# Altium footprint library Connectors.PcbLib: 320 footprints (part 6 of 20)
Each footprint in its own frame and in the unit in brackets; x right, y up, seen from the top. Pads: shape width x height; smd on the part's side, far side on the other; paste and mask are expansions set on the pad; w line width, h text height; cw(c..) or ccw(c..) is an arc to the next point about the centre after c.
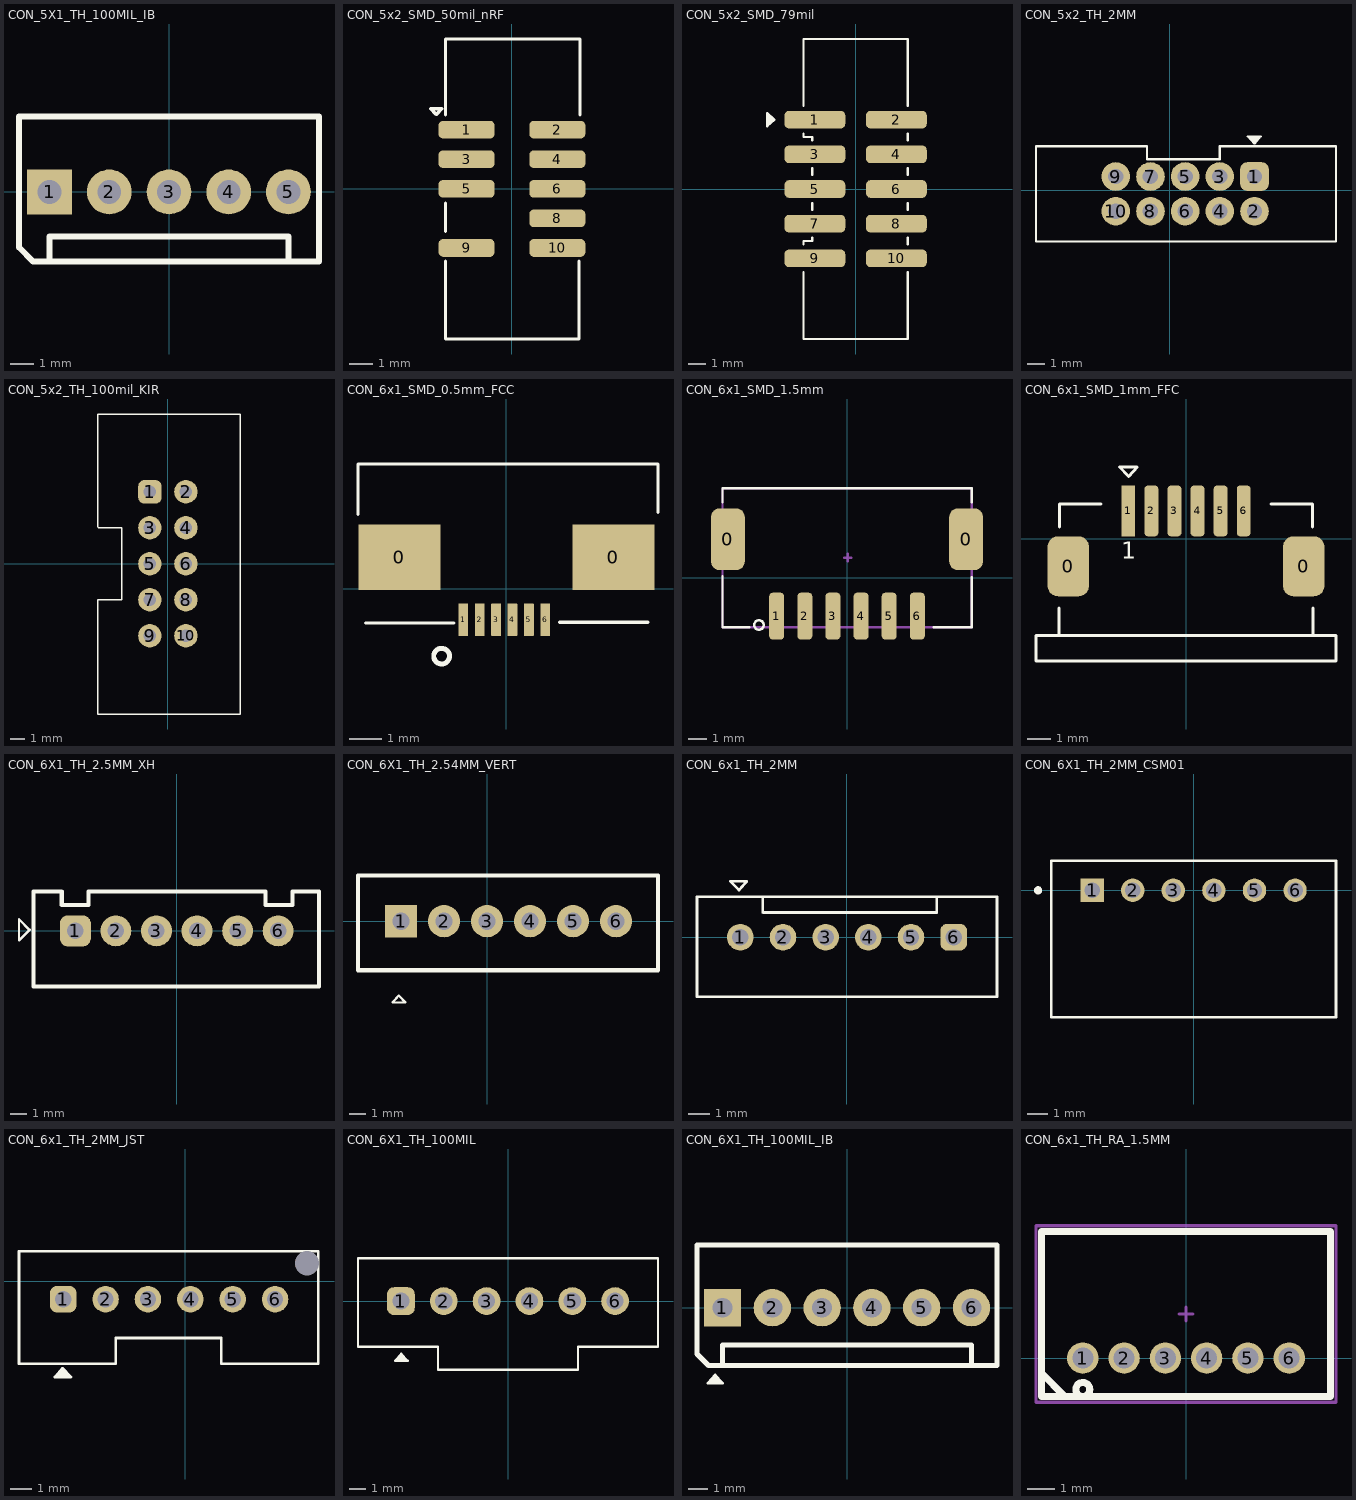
[diagram p5: the footprints below, top view; thin cyan lines are the x and y axes]

## CON_5X1_TH_100MIL_IB [mil] "/20200110/V-A.Patino"
pads (5):
  rect 75x75 hole 40: 1(-200,0)
  round 75 hole 40: 2(-100,0) 3(0,0) 4(100,0) 5(200,0)
Top Overlay:
  lines w10: -200,-115.35 -200,-75 200,-75 200,-114.96 ; -251.18,-92.91 -251.18,125.98 251.18,125.98 251.18,-116.14 -227.95,-116.14 -251.18,-92.91
3D body "022272051.stp": height 461.13, standoff -139.65, extent -251.18,-112.99 248.82,115.35

## CON_5x2_SMD_50mil_nRF [mm] "/ 200102/ C-A.Serna.A"
pads (9):
  rrect50% 2.4x0.76 smd: 1(-1.95,2.54) 2(1.95,2.54) 3(-1.95,1.27) 4(1.95,1.27) 5(-1.95,0) 6(1.95,0) 8(1.95,-1.27) 9(-1.95,-2.54) 10(1.95,-2.54)
Top Overlay:
  lines w0.127: -2.85,-3.104 -2.85,-6.45 2.87,-6.45 2.87,-3.104 ; -2.85,-1.829 -2.85,-0.61 ; -2.85,3.166 -2.85,6.432 2.915,6.432 2.915,3.166
  lines w0.152: -3.26,3.201 -3.239,3.201 ; -3.26,3.201 -3.239,3.201 ; -3.26,3.201 -3.49,3.43 -3.01,3.43 -3.239,3.201
3D body "3220-10-0300.step": height 5.61, standoff 0.01, extent -2.71,-6.33 2.79,6.32

## CON_5x2_SMD_79mil [mm] "/ 20191104 / C-D Viveros"
pads (10):
  rrect50% 3.5x1.02 smd: 1(-2.35,4) 2(2.35,4) 3(-2.35,2) 4(2.35,2) 5(-2.35,0) 6(2.35,0) 7(-2.35,-2) 8(2.35,-2) 9(-2.35,-4) 10(2.35,-4)
Top Overlay:
  region: -5.1,4.381 -5.1,3.619 -4.686,4.014
  lines w0.127: -3,-4.8 -3,-8.65 3,-8.65 3,-4.8 ; -3,-3.2 -3,-3 -2.5,-3 -2.5,-2.8 ; -3,3.2 -3,3 -2.5,3 -2.5,2.8 ; -3,4.8 -3,8.65 3,8.65 3,4.8 ; -2.5,-1.2 -2.5,-0.8 ; -2.5,0.8 -2.5,1.2 ; 3,-3.2 3,-2.8 ; 3,-1.2 3,-0.8 ; 3,0.8 3,1.2 ; 3,2.8 3,3.2 ; -5.1,3.619 -4.686,4.014 -5.1,4.381 -5.1,3.619
3D body "SBH21-_ _ _N-D05-SM-_ _.STEP": height 6.96, standoff 0.01, extent -3.8,-8.65 3.8,8.65

## CON_5x2_TH_2MM [mil] "20230525/ J.Jaramillo"
pads (10):
  rrect50% 65x65 hole 35: 1(192.91,31.5)
  round 65 hole 35: 2(192.91,-47.24) 3(114.17,31.5) 4(114.17,-47.24) 5(35.43,31.5) 6(35.43,-47.24) 7(-43.31,31.5) 8(-43.31,-47.24) 9(-122.05,31.5) 10(-122.05,-47.24)
Top Overlay:
  region: 207.35,122.62 177.35,122.62 192.91,106.3
  lines w5: -303.15,-116.29 -303.15,100.39 -51.18,100.39 -51.18,70.87 114.17,70.87 114.17,100.39 377.95,100.39 377.95,-116.29 -303.15,-116.29 ; 177.35,122.62 192.91,106.3 207.35,122.62 177.35,122.62
3D body "A2005WV-N-2x5P.stp": height 224.41, standoff -110.24, extent -305.49,-116.29 375.61,100.25

## CON_5x2_TH_100mil_KIR [mil] "/ 20190221 / C-A.Serna.A"
pads (10):
  rrect50% 65x65 hole 35: 1(-50,200)
  round 65 hole 35: 2(50,200) 3(-50,100) 4(50,100) 5(-50,0) 6(50,0) 7(-50,-100) 8(50,-100) 9(-50,-200) 10(50,-200)
Top Overlay:
  lines w3.94: -195,101 -195,416 201,416 201,-417 -195,-417 -195,-100 -128,-100 -128,100 -194,100
3D body "User Library-BH_10_V.STEP": height 393.7, standoff -78.74, extent -179,-400 179.27,400

## CON_6x1_SMD_0.5mm_FCC [mm] "/20210126/J-E.Pachon"
pads (8):
  rect 2.5x2 smd: 0(-3.262,0.95) 0(3.262,0.95)
  rrect20% 0.3x1 smd mask+0.076: 1(-1.312,-0.95) 2(-0.812,-0.95) 3(-0.312,-0.95) 4(0.188,-0.95) 5(0.688,-0.95) 6(1.188,-0.95)
Top Overlay:
  circle w0.152: c-1.974,-2.062 r0.24
  lines w0.102: -4.522,2.268 -4.522,3.8 4.625,3.8 4.625,2.318 ; -4.296,-1.052 -1.604,-1.052 ; 1.622,-1.03 4.315,-1.03
3D body "545480671.stp": height 1.17, standoff -0.03, extent -4.167,-1.079 4.033,3.921

## CON_6x1_SMD_1.5mm [mm] "/ 20201109/ N-A.Potosi"
pads (8):
  rrect50% 1.8x3.3 smd: 0(-6.35,2.05) 0(6.35,2.05)
  rrect50% 0.8x2.5 smd: 1(-3.75,-2.05) 2(-2.25,-2.05) 3(-0.75,-2.05) 4(0.75,-2.05) 5(2.25,-2.05) 6(3.75,-2.05)
Top Overlay:
  circle w0.127: c-4.696,-2.523 r0.254
  lines w0.127: -6.64,0.08 -6.64,-2.64 -5.22,-2.64 ; -6.64,4.02 -6.64,4.76 6.66,4.76 6.66,4.03 ; 4.62,-2.64 6.66,-2.64 6.66,0.02
Mechanical 1:
  lines w0.127: -6.64,-2.64 -6.64,4.76 6.66,4.76 6.66,-2.64 -6.64,-2.64
Mechanical 15:
  lines w0.127: -0.16,1.07 0.24,1.07 ; 0.04,0.87 0.04,1.27 ; -6.64,-2.64 6.66,-2.64 6.66,4.76 -6.64,4.76 -6.64,-2.64
3D body "5025840670.stp": height 7.28, standoff -0.02, extent -6.64,-2.64 6.66,4.76

## CON_6x1_SMD_1mm_FFC [mm] "/ 20230224/ N-A.Potosi"
pads (8):
  rrect50% 1.8x2.6 smd: 0(-5.1,-1.2) 0(5.1,-1.2)
  rect 0.6x2.2 smd: 1(-2.5,1.2)
  rrect50% 0.6x2.2 smd: 2(-1.5,1.2) 3(-0.5,1.2) 4(0.5,1.2) 5(1.5,1.2) 6(2.5,1.2)
Top Overlay:
  lines w0.127: -5.5,-3 -5.5,-4.2 ; -5.477,0.5 -5.477,1.5 -3.677,1.5 ; 3.677,1.5 5.477,1.5 5.477,0.5 ; 5.5,-3 5.5,-4.2 ; -5.5,-4.2 -6.5,-4.2 -6.5,-5.3 6.5,-5.3 6.5,-4.2 5.5,-4.2 ; -5.5,-4.2 5.5,-4.2 ; -2.881,3.1 -2.486,2.686 -2.119,3.1 -2.881,3.1
  text "1" at -2.806,-1.127 h1.26
3D body "686106148922_Download_STP_686106148922_rev1.stp": height 2.3, standoff 0.05, extent -5.3,-4.65 5.3,1.85

## CON_6X1_TH_2.5MM_XH [mm] "/20201014/C-A.Serna.A"
height 9.8
pads (6):
  rrect50% 1.905x1.905 hole 1.016: 1(-6.25,0)
  round 1.905 hole 1.016: 2(-3.75,0) 3(-1.25,0) 4(1.25,0) 5(3.75,0) 6(6.25,0)
Top Overlay:
  lines w0.152: -9.725,-0.585 -9.725,0.715 -9.075,0.065 -9.725,-0.585
  lines w0.254: -8.83,-3.43 -8.83,2.43 -7.092,2.43 -7.092,1.604 -5.441,1.604 -5.441,2.43 5.481,2.43 5.481,1.604 7.132,1.604 7.132,2.43 8.77,2.43 8.77,-3.43 -8.83,-3.43
3D body "User Library-jst-b6b-xh-a.STEP": height 7.01, standoff -3.39, extent -8.71,-3.385 8.69,2.365
3D body: height 9.8, standoff 3, extent -8.132,-2.856 8.132,1.576

## CON_6X1_TH_2.54MM_VERT [mil] "/20230331/J-E.Pachon"
pads (6):
  rect 75x75 hole 40: 1(-200,0)
  round 75 hole 40: 2(-100,0) 3(0,0) 4(100,0) 5(200,0) 6(300,0)
Top Overlay:
  lines w5: -219.72,-188.98 -189.72,-188.98 -205.29,-172.66 -219.72,-188.98
  lines w10: -300,-114.17 397.64,-114.17 397.64,106.3 -300,106.3 -300,-114.17
3D body "705430040.stp": height 464.96, standoff -130.04, extent -298.82,-160 401.18,100

## CON_6x1_TH_2MM [mm] "/202010803/J-E.Pachon"
pads (6):
  round 1.25 hole 0.762: 1(-5,0) 2(-3,0) 3(-1,0) 4(1,0) 5(3,0)
  rrect50% 1.25x1.25 hole 0.762: 6(5,0)
Top Overlay:
  lines w0.127: -3.95,1.87 -3.95,1.17 -3.94,1.16 4.2,1.16 4.2,1.89 ; -7.03,-2.79 -7.03,1.89 3.36,1.89 7.03,1.89 7.03,-2.79 -7.03,-2.79 ; -5.458,2.62 -5.063,2.205 -4.696,2.62 -5.458,2.62
3D body "B6B-PH-K-S.step": height 6, standoff -3.4, extent -6.96,-2.78 6.94,1.92

## CON_6X1_TH_2MM_CSM01 [mm] "/20210121/V-A.Patino"
pads (6):
  rect 1.15x1.15 hole 0.762: 1(-5,0)
  round 1.15 hole 0.762: 2(-3,0) 3(-1,0) 4(1,0) 5(3,0) 6(5,0)
Top Overlay:
  circle w0.2: c-7.666,0 r0.1
  lines w0.127: -7.016,-6.25 7.017,-6.25 7.017,1.45 -7.016,1.45 -7.016,-6.25
3D body "c-440055-6-b3-3d.stp": height 4.96, standoff -3.39, extent -7.016,-6.25 6.983,1.45

## CON_6x1_TH_2MM_JST [mm] "/ 20190222 / C-A.Serna.A"
pads (7):
  rrect50% 1.25x1.25 hole 0.762: 1(-5.75,-0.85)
  round 1.25 hole 0.762: 2(-3.75,-0.85) 3(-1.75,-0.85) 4(0.25,-0.85) 5(2.25,-0.85) 6(4.25,-0.85)
  round 1.1 hole 1.143 paste-2539.97 mask+0.102: ""(5.75,0.85)
Top Overlay:
  region: -6.144,-4.517 -5.382,-4.517 -5.777,-4.103
  lines w0.127: -7.837,-3.898 -3.265,-3.898 -3.265,-2.676 1.714,-2.676 1.714,-3.898 6.286,-3.898 6.286,1.411 6.108,1.411 -7.837,1.411 -7.837,-3.898 ; -6.144,-4.517 -5.777,-4.103 -5.382,-4.517 -6.144,-4.517
3D body "Custom_Connector_2mm_6pos_B06B-PASK.STEP": height 7.72, standoff -2.98, extent -7.775,-3.95 6.225,1.35

## CON_6X1_TH_100MIL [mil] "/ 20190411 / C-D Viveros"
pads (6):
  rrect50% 65x65 hole 40: 1(-250,0)
  round 65 hole 40: 2(-150,0) 3(-50,0) 4(50,0) 5(150,0) 6(250,0)
Top Overlay:
  region: -263.6,-139 -233.6,-139 -249.16,-122.68
  lines w5: -350.01,-106.3 -163.39,-106.3 -163.39,-160 163.37,-160 163.37,-106.3 349.99,-106.3 349.99,100 -350.01,100 -350.01,-106.3 ; -263.6,-139 -233.6,-139 -249.16,-122.68 -263.6,-139
3D body "705430005.stp": height 450.5, standoff -144.5, extent -350.01,-160 349.99,100

## CON_6X1_TH_100MIL_IB [mil] "/20200110/V-A.Patino"
pads (6):
  rect 75x75 hole 40: 1(-250,0)
  round 75 hole 40: 2(-150,0) 3(-50,0) 4(50,0) 5(150,0) 6(250,0)
Top Overlay:
  region: -279.43,-151.16 -249.43,-151.16 -265,-134.84
  lines w5: -279.43,-151.16 -249.43,-151.16 -265,-134.84 -279.43,-151.16
  lines w10: -250,-115.35 -250,-75 250,-75 250,-114.96 ; -301.18,-92.91 -301.18,125.98 301.18,125.98 301.18,-116.14 -277.95,-116.14 -301.18,-92.91
3D body "022272061.stp": height 461.13, standoff -139.65, extent -300,-112.99 300,115.35

## CON_6x1_TH_RA_1.5MM [mil] "/20200527/H-D.Garcia"
pads (6):
  round 45 hole 30: 1(-147.64,0) 2(-88.58,0) 3(-29.53,0) 4(29.53,0) 5(88.58,0) 6(147.64,0)
Top Overlay:
  circle w10: c-147.64,-44.97 r10
  lines w10: -206.69,-21.65 -173.42,-54.92 ; -206.69,-55.12 -206.69,181.1 206.69,181.1 206.69,-55.12 -206.69,-55.12
Mechanical 15:
  lines w5: -9.84,62.99 9.84,62.99 ; 0,53.15 0,72.83 ; -214.57,-62.99 214.57,-62.99 214.57,188.98 -214.57,188.98 -214.57,-62.99
3D body "S6B-ZR.STEP": height 146.17, standoff -105.79, extent -206.69,-55.12 206.69,181.1